# Altium footprint library Connector_SMD.PcbLib: 116 footprints (part 8 of 8)
Each footprint in its own frame and in the unit in brackets; x right, y up, seen from the top. Pads: shape width x height; smd on the part's side, far side on the other; paste and mask are expansions set on the pad; w line width, h text height; cw(c..) or ccw(c..) is an arc to the next point about the centre after c.
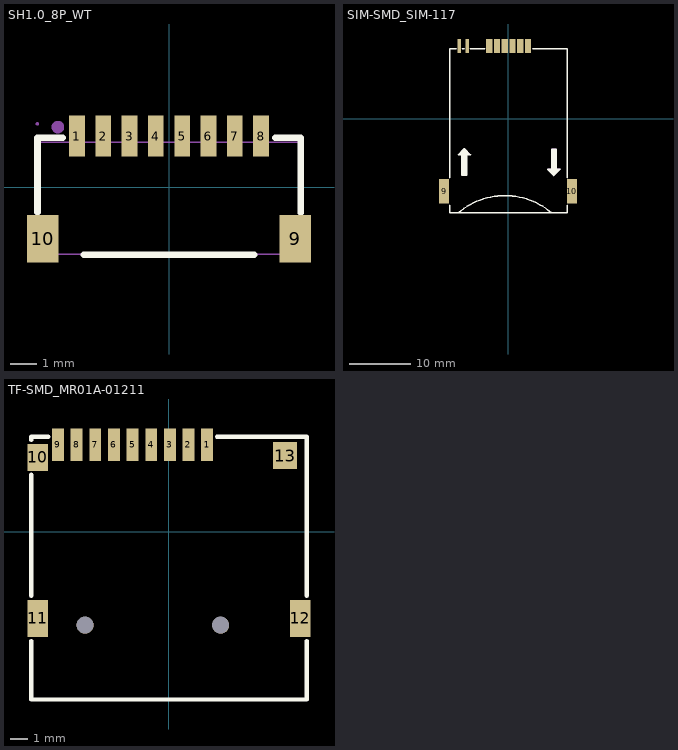
[diagram p7: the footprints below, top view; thin cyan lines are the x and y axes]

## SH1.0_8P_WT [mm]
pads (10):
  rect 0.6x1.55 smd paste+0 mask+0.051: 1(-3.5,1.95) 2(-2.5,1.95) 3(-1.5,1.95) 4(-0.5,1.95) 5(0.5,1.95) 6(1.5,1.95) 7(2.5,1.95) 8(3.5,1.95)
  rect 1.2x1.8 smd paste+0 mask+0.051: 9(4.8,-1.95) 10(-4.8,-1.95)
Top Overlay:
  lines w0.254: -4.999,-0.949 -4.999,1.885 -4.033,1.885 ; -3.239,-2.557 3.239,-2.557 ; 4.034,1.884 5.004,1.884 5.004,-0.953
Mechanical 6:
  circle w0.24: c-4.221,2.291 r0.12
Mechanical 15:
  region: -4.941,2.411 -4.941,2.435 -4.976,2.471 -5.026,2.471 -5.061,2.435 -5.061,2.411 -5.061,2.386 -5.026,2.351 -4.976,2.351 -4.941,2.386 -4.941,2.411
  region: -0.399,1.611 -0.599,1.611 -0.599,2.411 -0.399,2.411
  region: -1.398,1.611 -1.598,1.611 -1.598,2.411 -1.398,2.411
  region: -2.401,1.611 -2.601,1.611 -2.601,2.411 -2.401,2.411
  region: -3.401,1.611 -3.601,1.611 -3.601,2.411 -3.401,2.411
  region: -4.902,-1.486 -4.702,-1.486 -4.702,-2.486 -4.902,-2.486
  region: 3.603,1.609 3.403,1.609 3.403,2.409 3.603,2.409
  region: 2.603,1.609 2.403,1.609 2.403,2.409 2.603,2.409
  region: 4.702,-1.489 4.902,-1.489 4.902,-2.489 4.702,-2.489
  region: 1.601,1.611 1.401,1.611 1.401,2.411 1.601,2.411
  region: 0.601,1.611 0.401,1.611 0.401,2.411 0.601,2.411
  lines w0.051: 5,-2.549 -5.001,-2.549 -5.001,1.711 5,1.711 ; 5.001,-2.551 5.001,1.709
3D body "8PWT.step": height 3.14, standoff 0, extent -5.18,-2.756 5.18,2.294

## SIM-SMD_SIM-117 [mm]
pads (10):
  rect 1x2.3 smd: 1(3.28,11.875) 2(2.01,11.875) 3(0.74,11.875) 4(-0.53,11.875) 5(-1.8,11.875) 6(-3.07,11.875)
  rect 0.5x2.3 smd: 7(-6.66,11.875) 8(-7.96,11.875)
  rect 1.7x4 smd: 9(-10.45,-11.875) 10(10.45,-11.875)
Top Overlay:
  region: 7.112,-8.257 7.112,-4.955 7.874,-4.955 7.874,-8.257 8.509,-8.257 7.494,-9.272 7.492,-9.272 6.477,-8.257
  region: -6.754,-5.909 -6.754,-9.211 -7.516,-9.211 -7.516,-5.909 -8.151,-5.909 -7.135,-4.893 -7.134,-4.893 -6.119,-5.909
  lines w0.254: -9.55,-14.101 -9.55,-15.375 9.65,-15.375 9.65,-14.106 ; -9.55,-9.649 -9.55,11.465 -8.441,11.465 ; -8.151,-5.909 -7.516,-5.909 -7.516,-9.211 -6.753,-9.211 -6.753,-5.909 -6.118,-5.909 -7.134,-4.893 -8.15,-5.909 ; -8.12,-15.375 cw(c-0.5,-24.265) 7.12,-15.375 ; -7.479,11.465 -7.141,11.465 ; -6.179,11.465 -3.801,11.465 ; 4.011,11.465 9.64,11.465 ; 9.65,-9.644 9.65,11.465 ; 6.476,-8.256 7.111,-8.256 7.111,-4.955 7.874,-4.955 7.874,-8.257 8.509,-8.257 8.508,-8.257 7.492,-9.272 6.476,-8.256
Mechanical 15:
  region: -6.118,-5.909 -7.134,-4.893 -8.151,-5.908 -7.516,-5.908 -7.516,-9.21 -6.754,-9.21 -6.754,-5.908 -6.119,-5.908
  region: 6.477,-8.195 7.493,-9.21 8.509,-8.195 7.874,-8.195 7.874,-4.893 7.112,-4.893 7.112,-8.195 6.477,-8.195

## TF-SMD_MR01A-01211 [mm]
pads (15):
  rect 0.7x1.9 smd: 1(2.25,5.125) 2(1.15,5.125) 3(0.05,5.125) 4(-1.05,5.125) 5(-2.15,5.125) 6(-3.25,5.125) 7(-4.35,5.125) 8(-5.45,5.125) 9(-6.55,5.125)
  rect 1.2x1.6 smd: 10(-7.75,4.375)
  rect 1.2x2.2 smd: 11(-7.75,-5.125) 12(7.75,-5.125)
  rect 1.4x1.6 smd: 13(6.85,4.475)
  round 1 hole 1 unplated: ""(-4.95,-5.525) ""(3.05,-5.527)
Top Overlay:
  lines w0.254: -8.128,-6.456 -8.128,-9.906 8.128,-9.906 8.128,-6.456 ; -8.128,-3.794 -8.128,3.344 ; -8.128,5.406 -8.128,5.588 -7.131,5.588 ; 2.831,5.588 8.128,5.588 8.128,-3.794
3D body "User Library-MEM2055-00-190-01-A_revG.STEP": height 1.85, standoff -0.6, extent -8,-9.8 8,5.45

## XT60PW-F [mm]